# Altium footprint library Amin-Library.PcbLib: 601 footprints (part 37 of 38)
Each footprint in its own frame and in the unit in brackets; x right, y up, seen from the top. Pads: shape width x height; smd on the part's side, far side on the other; paste and mask are expansions set on the pad; w line width, h text height; cw(c..) or ccw(c..) is an arc to the next point about the centre after c.
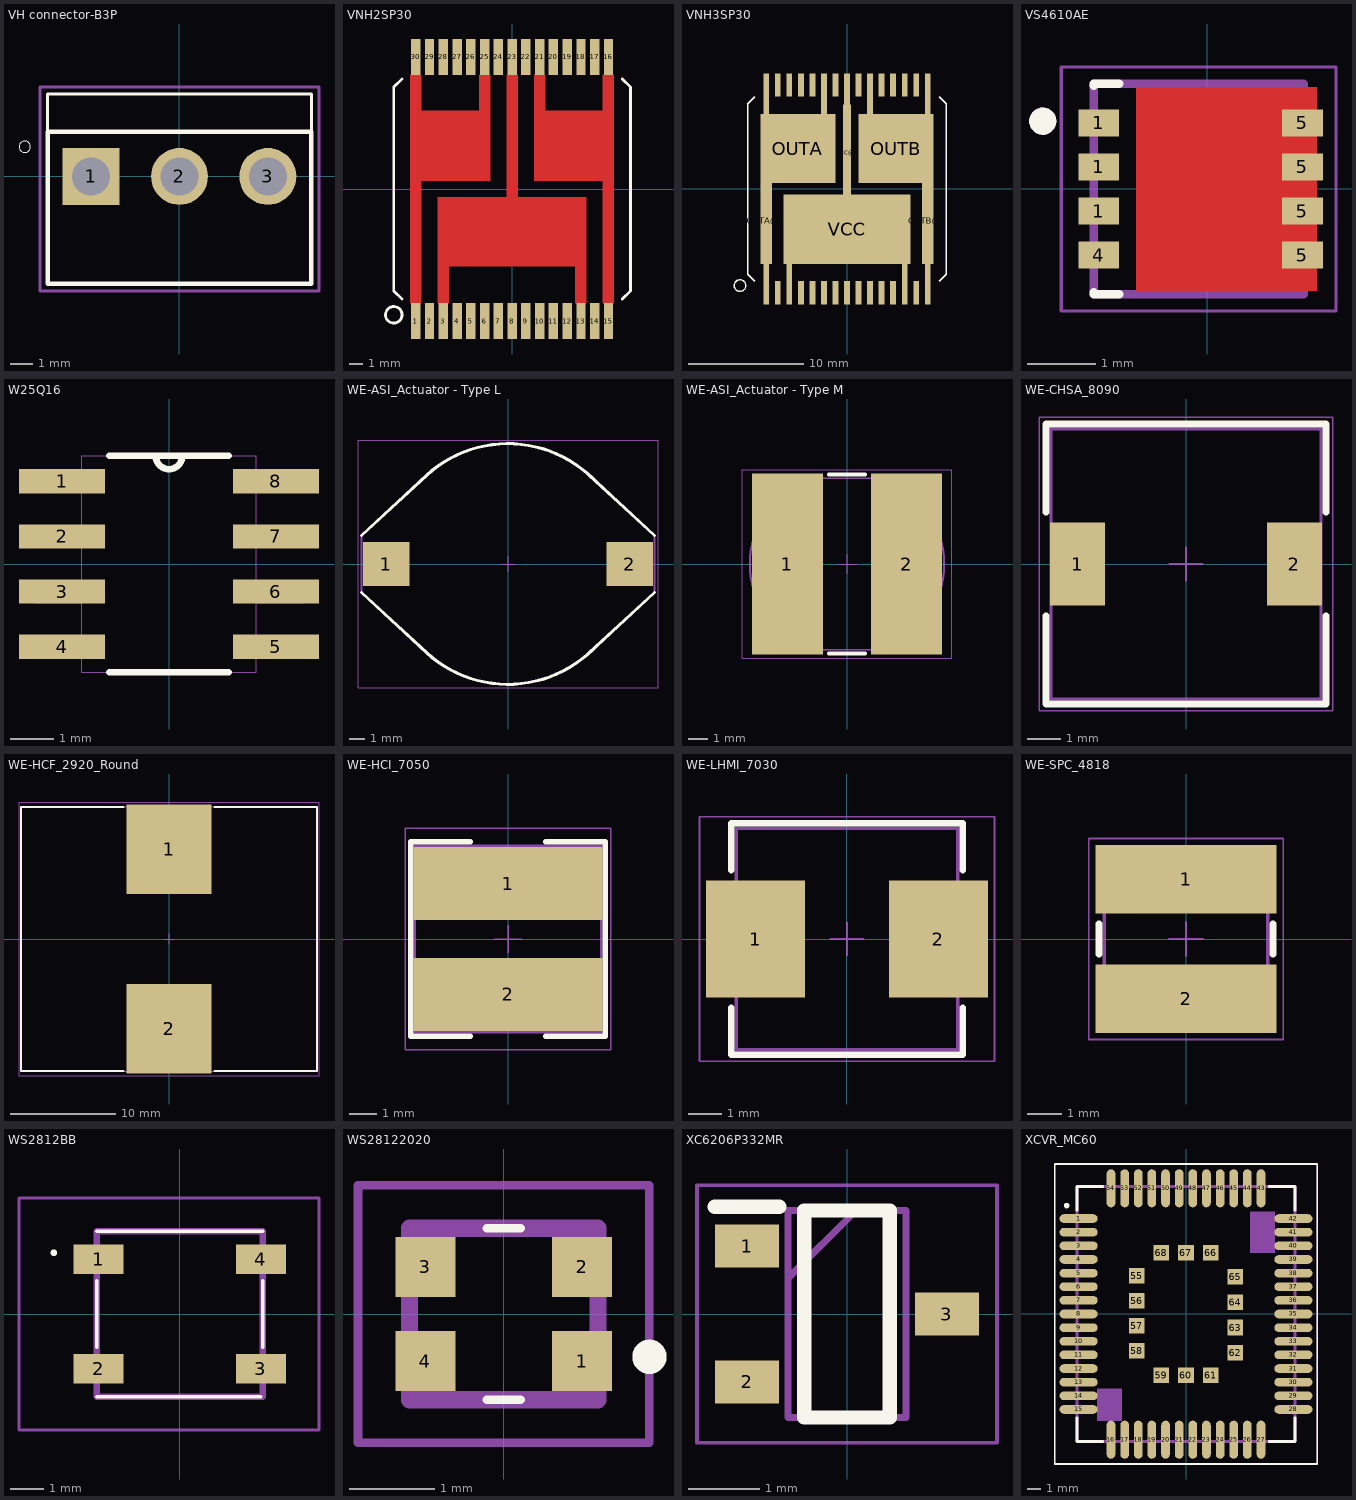
[diagram p36: the footprints below, top view; thin cyan lines are the x and y axes]

## VH connector-B3P [mm] "VH connector 3pin"
pads (3):
  rect 2.55x2.55 / inner round 2.55 / far side rect 2.55x2.55 hole 1.7: 1(-3.96,0)
  round 2.55 hole 1.7: 2(0,0) 3(3.96,0)
Top Overlay:
  circle w0: c-6.935,1.33 r0.254
  lines w0.127: -5.91,2 -5.91,3.7 5.91,3.7 5.91,2
  lines w0.203: -5.91,-4.8 5.91,-4.8 5.91,2 -5.91,2 -5.91,-4.8
Mechanical 15:
  lines w0.127: -6.25,-5.125 -6.25,4 6.25,4 6.25,-5.125 -6.25,-5.125
3D body "step_temp.STEP": height 11.15, standoff -3.45, extent -6.096,-4.572 5.724,3.928

## VNH2SP30 [mm] "MULTIPOWER30"
pads (30):
  rect 0.68x2.6 smd: 1(-7,-9.6) 2(-6,-9.6) 3(-5,-9.6) 4(-4,-9.6) 5(-3,-9.6) 6(-2,-9.6) 7(-1,-9.6) 8(0,-9.6) 9(1,-9.6) 10(2,-9.6) 11(3,-9.6) 12(4,-9.6) 13(5,-9.6) 14(6,-9.6) 15(7,-9.6) 16(7,9.6) 17(6,9.6) 18(5,9.6) 19(4,9.6) 20(3,9.6) 21(2,9.6) 22(1,9.6) 23(0,9.6) 24(-1,9.6) 25(-2,9.6) 26(-3,9.6) 27(-4,9.6) 28(-5,9.6) 29(-6,9.6) 30(-7,9.6)
Top Layer:
  region: -4.6,-8.316 -5.41,-8.316 -5.41,-5.6 -4.6,-5.6
  region: 5.4,-8.304 4.602,-8.304 4.602,-5.6 5.4,-5.6
  region: 0.4,-0.601 -0.4,-0.601 -0.4,8.3 0.4,8.3
  region: -1.6,5.701 -2.4,5.701 -2.4,8.3 -1.6,8.3
  region: 2.4,5.703 1.601,5.703 1.601,8.3 2.4,8.3
  region: 7.4,5.702 6.602,5.702 6.602,8.3 7.4,8.3
  region: -6.6,5.704 -7.405,5.704 -7.405,8.3 -6.6,8.3
  region: 7.4,-8.3 6.6,-8.3 6.6,0.6 7.4,0.6
  region: -6.6,-8.303 -7.402,-8.303 -7.402,0.6 -6.6,0.6
  region: -1.6,0.601 -7.413,0.601 -7.413,5.7 -1.6,5.7
  region: 7.4,0.601 1.603,0.601 1.603,5.7 7.4,5.7
  region: 5.4,-5.6 4.602,-5.6 4.602,-5.605 -4.6,-5.605 -4.6,-5.6 -5.405,-5.6 -5.405,-0.6 -0.4,-0.6 -0.4,-0.601 0.4,-0.601 0.4,-0.6 5.4,-0.6
Top Overlay:
  circle w0.203: c-8.6,-9.144 r0.6
  lines w0.203: -8,-8 -8.6,-7.4 -8.6,7.4 -8,8 ; 8,-8 8.6,-7.4 8.6,7.4 8,8

## VNH3SP30 [mm] "Motor Driver Power MOSFET Parallel, PWM MultiPowerSO-30"
pads (36):
  rect 0.508x12 smd paste-7 mask+0: 1(-7,-4) 15(7,-4) 16(7,4) 30(-7,4)
  rect 0.508x2 smd: 2(-6,-9) 4(-4,-9) 5(-3,-9) 6(-2,-9) 7(-1,-9) 8(0,-9) 9(1,-9) 10(2,-9) 11(3,-9) 12(4,-9) 14(6,-9) 17(6,9) 18(5,9) 19(4,9) 20(3,9) 22(1,9) 24(-1,9) 26(-3,9) 27(-4,9) 28(-5,9) 29(-6,9)
  rect 0.508x4 smd paste-3 mask+0: 3(-5,-8) 13(5,-8) 21(2,8) 23(0,8) 25(-2,8)
  rect 6.5x6 smd paste-4 mask+0: OUTA(-4.25,3.5) OUTB(4.25,3.5)
  rect 1x7.5 smd paste-5 mask+0: OUTA@1(-7,-2.755) OUTB@1(7,-2.755)
  rect 11x6 smd paste-7 mask+0: VCC(0,-3.5)
  rect 0.65x8.3 smd paste-5 mask+0: VCC@1(0,3.145)
Top Overlay:
  circle w0.127: c-9.271,-8.382 r0.5
  lines w0.127: -8,-8 -8.6,-7.4 -8.6,7.4 -8,8 ; 8,-8 8.6,-7.4 8.6,7.4 8,8
Top Paste:
  circle w0: c4,-5.5 r0.3
  circle w0: c2,-5.5 r0.3
  circle w0: c0,-5.5 r0.3
  circle w0: c-2,-5.5 r0.3
  circle w0: c-4,-5.5 r0.3
  circle w0: c4,-3.5 r0.3
  circle w0: c2,-3.5 r0.3
  circle w0: c0,-3.5 r0.3
  circle w0: c-2,-3.5 r0.3
  circle w0: c-4,-3.5 r0.3
  circle w0: c4,-1.5 r0.3
  circle w0: c2,-1.5 r0.3
  circle w0: c0,-1.5 r0.3
  circle w0: c-2,-1.5 r0.3
  circle w0: c-4,-1.5 r0.3
  circle w0: c6,1.5 r0.3
  circle w0: c4,1.5 r0.3
  circle w0: c2,1.5 r0.3
  circle w0: c-2,1.5 r0.3
  circle w0: c-4,1.5 r0.3
  circle w0: c-6,1.5 r0.3
  circle w0: c6,3.5 r0.3
  circle w0: c4,3.5 r0.3
  circle w0: c2,3.5 r0.3
  circle w0: c-2,3.5 r0.3
  circle w0: c-4,3.5 r0.3
  circle w0: c-6,3.5 r0.3
  circle w0: c6,5.5 r0.3
  circle w0: c4,5.5 r0.3
  circle w0: c2,5.5 r0.3
  circle w0: c-2,5.5 r0.3
  circle w0: c-4,5.5 r0.3
  circle w0: c-6,5.5 r0.3
  region: 7.25,-10.014 6.763,-10.014 6.763,-7.995 7.25,-7.995
  region: 5.25,-9.996 4.751,-9.996 4.751,-7.995 5.25,-7.995
  region: -4.75,-9.996 -5.251,-9.996 -5.251,-7.995 -4.75,-7.995
  region: -6.75,-10 -7.253,-10 -7.253,-7.995 -6.75,-7.995
  region: 7.25,7.996 6.751,7.996 6.751,9.995 7.25,9.995
  region: 2.25,7.999 1.751,7.999 1.751,9.995 2.25,9.995
  region: 0.25,8.003 -0.25,8.003 -0.25,9.995 0.25,9.995
  region: -1.75,8.005 -2.253,8.005 -2.253,9.995 -1.75,9.995
  region: -6.75,8.006 -7.26,8.006 -7.26,9.995 -6.75,9.995
Top Solder:
  circle w0: c4,-5.5 r0.4
  circle w0: c2,-5.5 r0.4
  circle w0: c0,-5.5 r0.4
  circle w0: c-2,-5.5 r0.4
  circle w0: c-4,-5.5 r0.4
  circle w0: c4,-3.5 r0.4
  circle w0: c2,-3.5 r0.4
  circle w0: c0,-3.5 r0.4
  circle w0: c-2,-3.5 r0.4
  circle w0: c-4,-3.5 r0.4
  circle w0: c4,-1.5 r0.4
  circle w0: c2,-1.5 r0.4
  circle w0: c0,-1.5 r0.4
  circle w0: c-2,-1.5 r0.4
  circle w0: c-4,-1.5 r0.4
  circle w0: c6,1.5 r0.4
  circle w0: c4,1.5 r0.4
  circle w0: c2,1.5 r0.4
  circle w0: c-2,1.5 r0.4
  circle w0: c-4,1.5 r0.4
  circle w0: c-6,1.5 r0.4
  circle w0: c6,3.5 r0.4
  circle w0: c4,3.5 r0.4
  circle w0: c2,3.5 r0.4
  circle w0: c-2,3.5 r0.4
  circle w0: c-4,3.5 r0.4
  circle w0: c-6,3.5 r0.4
  circle w0: c6,5.5 r0.4
  circle w0: c4,5.5 r0.4
  circle w0: c2,5.5 r0.4
  circle w0: c-2,5.5 r0.4
  circle w0: c-4,5.5 r0.4
  circle w0: c-6,5.5 r0.4
  region: 7.35,-10.098 6.652,-10.098 6.652,-7.895 7.35,-7.895
  region: 5.35,-10.115 4.659,-10.115 4.659,-7.895 5.35,-7.895
  region: -4.65,-10.108 -5.357,-10.108 -5.357,-7.895 -4.65,-7.895
  region: -6.65,-10.096 -7.351,-10.096 -7.351,-7.895 -6.65,-7.895
  region: 7.35,7.898 6.653,7.898 6.653,10.095 7.35,10.095
  region: 2.35,7.909 1.653,7.909 1.653,10.095 2.35,10.095
  region: 0.35,7.906 -0.35,7.906 -0.35,10.095 0.35,10.095
  region: -1.65,7.902 -2.352,7.902 -2.352,10.095 -1.65,10.095
  region: -6.65,7.896 -7.351,7.896 -7.351,10.095 -6.65,10.095
3D body "VNH3SP30-E.STEP": height 2.37, standoff 0.03, extent -8.6,-9.627 8.6,9.373

## VS4610AE [mm] "DFN_3*3"
pads (8):
  rect 0.6x0.4 smd: 1(-1.602,-0.325) 1(-1.602,0.975) 1(-1.602,0.325) 4(-1.602,-0.975) 5(1.403,-0.975) 5(1.403,0.325) 5(1.403,-0.325) 5(1.403,0.975)
Top Layer:
  rectangle: -1.052,-1.505 1.618,1.505
Top Overlay:
  circle w0.2: c-2.427,1 r0.1
  lines w0.127: -1.677,-1.525 -1.677,-1.55 -1.302,-1.55 ; -1.677,1.525 -1.677,1.55 -1.302,1.55
Top Paste:
  region: 0.123,0.42 -0.757,0.42 -0.757,1.11 0.123,1.11
  region: 1.203,0.42 0.323,0.42 0.323,1.11 1.203,1.11
  region: 0.123,-1.11 -0.757,-1.11 -0.757,-0.42 0.123,-0.42
  region: 1.203,-1.11 0.323,-1.11 0.323,-0.42 1.203,-0.42
  region: 1.648,0.775 1.403,0.775 1.403,1.175 1.648,1.175
  region: 1.648,0.125 1.403,0.125 1.403,0.525 1.648,0.525
  region: 1.648,-0.525 1.403,-0.525 1.403,-0.125 1.648,-0.125
  region: 1.648,-1.175 1.403,-1.175 1.403,-0.775 1.648,-0.775
Top Solder:
  region: 1.498,1.275 1.748,1.275 1.748,0.675 1.498,0.675 1.498,0.625 1.748,0.625 1.748,0.025 -1.052,0.025 -1.052,1.505 1.498,1.505
  region: 1.748,-0.625 1.498,-0.625 1.498,-0.675 1.748,-0.675 1.748,-1.275 1.498,-1.275 1.498,-1.505 -1.052,-1.505 -1.052,0.42 1.748,0.42
Mechanical 13:
  circle w0.2: c-2.427,1 r0.1
  lines w0.127: -1.677,-1.55 -1.677,1.55 1.423,1.55 1.423,-1.55 -1.677,-1.55
Mechanical 15:
  lines w0.05: -2.152,-1.8 -2.152,1.8 1.898,1.8 1.898,-1.8 -2.152,-1.8
3D body "step_temp.STEP": height 0.8, standoff 0, extent -1.802,-1.6 1.548,1.6

## W25Q16 [mil]
pads (8):
  rect 78x22 smd: 1(-97,75) 2(-97,25) 3(-97,-25) 4(-97,-75) 5(97,-75) 6(97,-25) 7(97,25) 8(97,75)
Top Overlay:
  lines w6: -54,-98 54,-98 ; -54,98 -12,98 ; 54,98 12,98 ; -12,98 ccw(c0,98) 12,98 ; -12,98 12,98
Mechanical 4:
  lines w0: -122,-85 -79,-85 ; -122,-85 -122,-65 ; -122,-85 -79,-85 ; -122,-85 -122,-65 ; -122,-65 -79,-65 ; -122,-65 -79,-65 ; -122,-35 -79,-35 ; -122,-35 -122,-15 ; -122,-35 -79,-35 ; -122,-35 -122,-15 ; -122,-15 -79,-15 ; -122,-15 -79,-15 ; -122,15 -79,15 ; -122,15 -122,35 ; -122,15 -79,15 ; -122,15 -122,35 ; -122,35 -79,35 ; -122,35 -79,35 ; -122,65 -79,65 ; -122,65 -122,85 ; -122,65 -79,65 ; -122,65 -122,85 ; -122,85 -79,85 ; -122,85 -79,85 ; -79,-98 -79,98 ; -79,-98 79,-98 ; -79,-98 -79,98 ; -79,-98 79,-98 ; -79,-85 -79,-65 ; -79,-85 -79,-65 ; -79,-35 -79,-15 ; -79,-35 -79,-15 ; -79,15 -79,35 ; -79,15 -79,35 ; -79,65 -79,85 ; -79,65 -79,85 ; -79,98 -12,98 ; -79,98 -12,98 ; -12,98 ccw(c0,98) 12,98 ; -12,98 ccw(c0,98) 12,98 ; -12,98 12,98 ; -12,98 12,98 ; 12,98 79,98 ; 12,98 79,98 ; 79,-98 79,98 ; 79,-98 79,98 ; 79,-85 122,-85 ; 79,-85 79,-65 ; 79,-85 122,-85 ; 79,-85 79,-65 ; 79,-65 122,-65 ; 79,-65 122,-65 ; 79,-35 122,-35 ; 79,-35 79,-15 ; 79,-35 122,-35 ; 79,-35 79,-15 ; 79,-15 122,-15 ; 79,-15 122,-15 ; 79,15 122,15 ; 79,15 79,35 ; 79,15 122,15 ; 79,15 79,35 ; 79,35 122,35 ; 79,35 122,35 ; 79,65 122,65 ; 79,65 79,85 ; 79,65 122,65 ; 79,65 79,85 ; 79,85 122,85 ; 79,85 122,85 ; 122,-85 122,-65 ; 122,-85 122,-65 ; 122,-35 122,-15 ; 122,-35 122,-15 ; 122,15 122,35 ; 122,15 122,35 ; 122,65 122,85 ; 122,65 122,85
3D body "MAX1562ESA+--3DModel-STEP-56544.STEP": height 59.56, standoff -9.34, extent -118.1,-96.46 118.11,96.45

## WE-ASI_Actuator - Type L [mm] "Inductor, 2-Leads, Body 18,54x15,24mm"
height 12
pads (2):
  rect 2.92x2.79 smd: 1(-7.685,0) 2(7.685,0)
Top Overlay:
  lines w0.2: -9.25,-1.8 -5.131,-5.594 ; -9.25,1.8 -5.131,5.594 ; -5.137,-5.601 ccw(c0,0) 5.345,-5.403 ; -5.137,5.601 cw(c0,0) 5.345,5.403 ; 5.131,-5.594 9.25,-1.8 ; 5.131,5.594 9.25,1.8
Mechanical 13:
  lines w0.1: -5.137,-5.601 ccw(c0,0) 5.345,-5.403 ; -5.137,5.601 cw(c0,0) 5.345,5.403 ; -5.131,-5.594 -9.25,-1.8 -9.25,1.8 -5.131,5.594 ; 5.131,-5.594 9.25,-1.8 9.25,1.8 5.131,5.594
Mechanical 15:
  lines w0.05: -0.5,0 0.5,0 ; 0,-0.5 0,0.5 ; -9.47,-7.82 9.47,-7.82 9.47,7.82 -9.47,7.82 -9.47,-7.82
3D body "Typ_L_74458308.stp": height 12, standoff 0, extent -9.27,-7.62 9.27,7.62

## WE-ASI_Actuator - Type M [mm] "Inductor, 2-Leads"
height 6.5
pads (2):
  rect 3.75x9.5 smd: 1(-3.125,0) 2(3.125,0)
Top Overlay:
  lines w0.2: -0.95,-4.7 0.95,-4.7 ; -0.95,4.7 0.95,4.7
Mechanical 13:
  lines w0.1: -2.4,-4.5 cw(c0,0) -2.4,4.5 2.4,4.5 cw(c0,0) 2.4,-4.5 -2.4,-4.5
Mechanical 15:
  lines w0.05: -0.5,0 0.5,0 ; 0,-0.5 0,0.5 ; -5.5,-4.95 -5.5,4.95 5.5,4.95 5.5,-4.95 -5.5,-4.95
3D body "Typ_M_744776347.stp": height 6.5, standoff -0.01, extent -5.052,-4.5 5.052,4.5

## WE-CHSA_8090 [mm] "SMT High Current Inductor, 2-Leads, body 8.1x8.1mm"
height 9.3
pads (2):
  rect 1.65x2.5 smd: 1(-3.25,0) 2(3.25,0)
Top Overlay:
  lines w0.2: -4.2,-1.55 -4.2,-4.2 4.2,-4.2 4.2,-1.55 ; -4.2,1.55 -4.2,4.2 4.2,4.2 4.2,1.55
Mechanical 13:
  lines w0.1: -4.05,-4.05 -4.05,4.05 4.05,4.05 4.05,-4.05 -4.05,-4.05
Mechanical 15:
  lines w0.05: -0.5,0 0.5,0 ; 0,-0.5 0,0.5 ; -4.4,-4.4 -4.4,4.4 4.4,4.4 4.4,-4.4 -4.4,-4.4
3D body "784334xxx.stp": height 9, standoff 0, extent -4.05,-4.05 4.05,4.05

## WE-HCF_2920_Round [mm] "SMD High Current Inductor, body 28x25mm"
height 20.5
pads (2):
  rect 8x8.5 smd: 1(0,8.5) 2(0,-8.5)
Top Overlay:
  lines w0.2: -4.3,-12.5 -14,-12.5 -14,12.5 -4.3,12.5 ; 4.3,-12.5 14,-12.5 14,12.5 4.3,12.5
Mechanical 13:
  lines w0.1: -14,-12.5 14,-12.5 14,12.5 -14,12.5 -14,-12.5
Mechanical 15:
  lines w0.05: -0.5,0 0.5,0 ; 0,-0.5 0,0.5
  lines w0.1: -14.2,-12.95 -14.2,12.95 14.2,12.95 14.2,-12.95 -14.2,-12.95
3D body "74437529203xxx.stp": height 20.1, standoff 0.1, extent -13.65,-11.548 13.65,11.548

## WE-HCI_7050 [mm] "SMT Flat Wire High Current Inductor, body 6.9x6.9mm"
height 5
pads (2):
  rect 7x2.7 smd: 1(0,2.05) 2(0,-2.05)
Top Overlay:
  lines w0.2: -1.4,-3.6 -3.6,-3.6 -3.6,3.6 -1.4,3.6 ; 1.4,-3.6 3.6,-3.6 3.6,3.6 1.4,3.6
Mechanical 13:
  lines w0.1: -3.45,-3.45 3.45,-3.45 3.45,3.45 -3.45,3.45 -3.45,-3.45
Mechanical 15:
  lines w0.05: -0.5,0 0.5,0 ; 0,-0.5 0,0.5 ; -3.8,-4.1 3.8,-4.1 3.8,4.1 -3.8,4.1 -3.8,-4.1
3D body "744314x.stp": height 5, standoff 0, extent -3.45,-3.5 3.45,3.5

## WE-LHMI_7030 [mm] "SMT Power Inductor, 2-Leads, body 6.6x6.6mm"
height 3
pads (2):
  rect 2.95x3.5 smd: 1(-2.725,0) 2(2.725,0)
Top Overlay:
  lines w0.2: -3.45,-2.05 -3.45,-3.45 3.45,-3.45 3.45,-2.05 ; -3.45,2.05 -3.45,3.45 3.45,3.45 3.45,2.05
Mechanical 13:
  lines w0.1: -3.3,-3.3 3.3,-3.3 3.3,3.3 -3.3,3.3 -3.3,-3.3
Mechanical 15:
  lines w0.05: -0.5,0 0.5,0 ; 0,-0.5 0,0.5 ; -4.4,-3.65 4.4,-3.65 4.4,3.65 -4.4,3.65 -4.4,-3.65
3D body "STEP-WE-LHMI-7030-rev1.stp": height 2.8, standoff 0, extent -3.65,-3.3 3.65,3.3

## WE-SPC_4818 [mm] "SMD Shielded Power Inductor, body 4.8x4.8mm"
height 2.1
pads (2):
  rect 5.3x2 smd: 1(0,1.75) 2(0,-1.75)
Top Overlay:
  lines w0.2: -2.55,-0.45 -2.55,0.45 ; 2.55,-0.45 2.55,0.45
Mechanical 13:
  lines w0.1: -2.4,-2.4 2.4,-2.4 2.4,2.4 -2.4,2.4 -2.4,-2.4
Mechanical 15:
  lines w0.05: -0.5,0 0.5,0 ; 0,-0.5 0,0.5 ; -2.85,-2.95 2.85,-2.95 2.85,2.95 -2.85,2.95 -2.85,-2.95
3D body "STEP-WE-SPC-4818-rev1.stp": height 1.8, standoff -0.01, extent -2.41,-2.41 2.41,2.41

## WS2812BB [mm]
pads (4):
  rect 1.5x0.9 smd: 1(-2.45,1.65) 2(-2.45,-1.65) 3(2.45,-1.65) 4(2.45,1.65)
Top Overlay:
  lines w0.1: -2.5,-2.5 2.45,-2.5 ; -2.5,-1 -2.5,1 ; -2.5,2.5 2.5,2.5 ; 2.5,-1 2.5,1 ; -3.8,1.8 ccw(c-3.8,1.85) -3.8,1.9 ccw(c-3.8,1.85) -3.8,1.8
Mechanical 13:
  lines w0.2: -2.5,-2.5 2.5,-2.5 2.5,2.5 -2.5,2.5 -2.5,-2.5
Mechanical 15:
  lines w0.1: -4.85,-3.5 4.2,-3.5 4.2,3.5 -4.85,3.5 -4.85,-3.5
3D body "WS2812B-B.stp": height 1.72, standoff 0, extent -2.5,-2.5 2.5,2.5

## WS28122020 [mm]
pads (4):
  rect 0.7x0.7 smd: 1(0.915,-0.55) 2(0.915,0.55) 3(-0.915,0.55) 4(-0.915,-0.55)
Top Overlay:
  lines w0.1: -0.2,-1 0.2,-1 ; -0.2,1 0.2,1
  lines w0.2: 1.7,-0.6 ccw(c1.7,-0.5) 1.7,-0.4 ccw(c1.7,-0.5) 1.7,-0.6
Top Courtyard:
  lines w0.2: -1.1,-1 -1.1,1 1.1,1 1.1,-1 -1.1,-1
Mechanical 13:
  lines w0.2: -1.1,-1 -1.1,1 1.1,1 1.1,-1 -1.1,-1
Mechanical 15:
  lines w0.1: -1.7,-1.5 -1.7,1.5 1.7,1.5 1.7,-1.5 -1.7,-1.5
3D body "WS2812-2020.stp": height 0.94, standoff 0, extent -1.1,-1 1.1,1

## XC6206P332MR [mm]
pads (3):
  rect 0.9x0.6 smd: 1(-1.4,0.95) 2(-1.4,-0.95) 3(1.4,0)
Top Overlay:
  lines w0.2: -1.85,1.5 -0.95,1.5 ; -0.6,-1.45 0.6,-1.45 0.6,1.45 -0.6,1.45 -0.6,-1.45
Mechanical 13:
  lines w0.1: -0.825,0.5 0.125,1.45 ; -0.825,-1.45 0.825,-1.45 0.825,1.45 -0.825,1.45 -0.825,-1.45
Mechanical 15:
  lines w0.05: -2.1,-1.8 2.1,-1.8 2.1,1.8 -2.1,1.8 -2.1,-1.8
3D body "XC6206P332MR.stp": height 1.3, standoff 0, extent -1.4,-1.45 1.4,1.45

## XCVR_MC60 [mil]
pads (68):
  oval 110x25 smd: 1(-310,275.59) 2(-310,236.22) 3(-310,196.85) 4(-310,157.48) 5(-310,118.11) 6(-310,78.74) 7(-310,39.37) 8(-310,0) 9(-310,-39.37) 10(-310,-78.74) 11(-310,-118.11) 12(-310,-157.48) 13(-310,-196.85) 14(-310,-236.22) 15(-310,-275.59) 28(310,-275.59) 29(310,-236.22) 30(310,-196.85) 31(310,-157.48) 32(310,-118.11) 33(310,-78.74) 34(310,-39.37) 35(310,0) 36(310,39.37) 37(310,78.74) 38(310,118.11) 39(310,157.48) 40(310,196.85) 41(310,236.22) 42(310,275.59)
  oval 25x110 smd: 16(-216.54,-363) 17(-177.17,-363) 18(-137.8,-363) 19(-98.43,-363) 20(-59.05,-363) 21(-19.68,-363) 22(19.69,-363) 23(59.06,-363) 24(98.43,-363) 25(137.8,-363) 26(177.17,-363) 27(216.54,-363) 43(216.54,363) 44(177.17,363) 45(137.8,363) 46(98.43,363) 47(59.06,363) 48(19.69,363) 49(-19.68,363) 50(-59.05,363) 51(-98.43,363) 52(-137.8,363) 53(-177.17,363) 54(-216.54,363)
  rect 45x45 smd: 55(-142,111) 56(-142,38) 57(-142,-34) 58(-142,-106.3) 59(-70.87,-177.17) 60(0,-177.17) 61(70.87,-177.17) 62(142,-112) 63(142,-39) 64(142,34) 65(142,107) 66(70.87,177.16) 67(0,177.16) 68(-70.87,177.16)
Top Overlay:
  circle w7.87: c-344.49,312.99 r3.94
  lines w5: -379,-433 -379,433 379,433 379,-433 -379,-433
  lines w7.87: -314.96,-299.21 -314.96,-368.11 -240.16,-368.11 ; -314.96,299.21 -314.96,368.11 -240.16,368.11 ; 240.16,-368.11 314.96,-368.11 314.96,-299.21 ; 240.16,368.11 314.96,368.11 314.96,299.21
Mechanical 1:
  region: 185.07,295.28 255.91,295.28 255.91,177.19 185.07,177.19
  region: -256.4,-216.54 -185.04,-216.54 -185.04,-307.68 -256.4,-307.68
  region: 185.05,295.28 255.91,295.28 255.91,177.18 185.05,177.18
  region: -256.08,-216.54 -185.04,-216.54 -185.04,-307.3 -256.08,-307.3
  region: -256.41,-216.54 -185.04,-216.54 -185.04,-307.69 -256.41,-307.69
  region: 185.15,295.28 255.91,295.28 255.91,177.27 185.15,177.27
  lines w7.87: -314.96,-368.11 -314.96,368.11 314.96,368.11 314.96,-368.11 -314.96,-368.11
Mechanical 4:
  lines w1.97: -378.94,-433.07 -378.94,433.07 378.94,433.07 378.94,-433.07 -378.94,-433.07
3D body "User Library-Quectel MC60.step": height 82.68, standoff -0.04, extent -315.01,-368.16 315.01,368.16